# Altium footprint library SM712PTCT.PcbLib: 3 footprints
Each footprint in its own frame and in the unit in brackets; x right, y up, seen from the top. Pads: shape width x height; smd on the part's side, far side on the other; paste and mask are expansions set on the pad; w line width, h text height; cw(c..) or ccw(c..) is an arc to the next point about the centre after c.
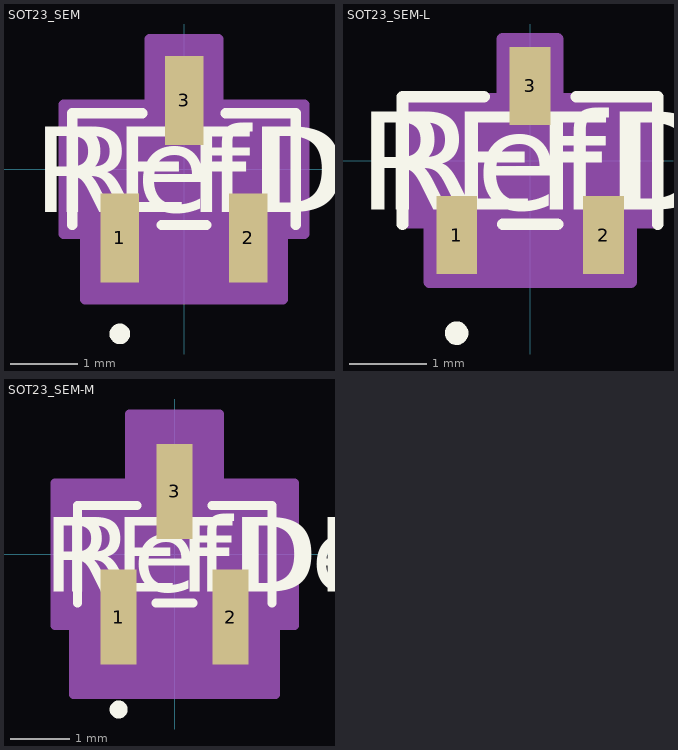
[diagram p0: the footprints below, top view; thin cyan lines are the x and y axes]

## SOT23_SEM [mil]
pads (3):
  rect 22.36x51.56 smd paste+0 mask+0: 1(-37.4,-40) 2(37.4,-40) 3(0,40)
Top Overlay:
  circle w6: c-37.4,-95.78 r3
  lines w6: -65,-32.5 -65,32.5 -24.28,32.5 ; -13.12,-32.5 13.12,-32.5 ; 24.28,32.5 65,32.5 65,-32.5
  text "REFDES" at -87.5,-25 h50
  text "RefDes" at -75,-25 h50
Mechanical 13:
  circle w0: c-37.4,-17.5 r3
  lines w1: -60,-27.5 60,-27.5 60,27.5 -60,27.5 -60,-27.5 ; -47.4,-52 -47.4,-27.5 -27.4,-27.5 -27.4,-52 -47.4,-52 ; -10,27.5 10,27.5 10,52 -10,52 -10,27.5 ; 27.4,-52 27.4,-27.5 47.4,-27.5 47.4,-52 27.4,-52
  text "RefDes2" at -87.5,-25 h50
Mechanical 15:
  region: -70,-37.5 -70,37.5 -20,37.5 -20,75.78 20,75.78 20,37.5 70,37.5 70,-37.5 57.4,-37.5 57.4,-75.78 -57.4,-75.78 -57.4,-37.5
  lines w6: -70,-37.5 -70,37.5 -20,37.5 -20,75.78 20,75.78 20,37.5 70,37.5 70,-37.5 57.4,-37.5 57.4,-75.78 -57.4,-75.78 -57.4,-37.5 -70,-37.5
3D body "SOT23_SEM.step": height 44.09, standoff 0, extent -60,-52.01 60,52.01

## SOT23_SEM-L [mm]
pads (3):
  rect 0.528x1.01 smd paste+0 mask+0: 1(-0.95,-0.966) 2(0.95,-0.966) 3(0,0.966)
Top Overlay:
  circle w0.152: c-0.95,-2.233 r0.076
  lines w0.152: -1.651,-0.826 -1.651,0.826 -0.597,0.826 ; -0.353,-0.826 0.353,-0.826 ; 0.597,0.826 1.651,0.826 1.651,-0.826
  text "REFDES" at -2.222,-0.635 h1.27
  text "RefDes" at -1.905,-0.635 h1.27
Mechanical 13:
  circle w0: c-0.95,-0.445 r0.076
  lines w0.025: -1.524,-0.699 1.524,-0.699 1.524,0.699 -1.524,0.699 -1.524,-0.699 ; -1.204,-1.321 -1.204,-0.699 -0.696,-0.699 -0.696,-1.321 -1.204,-1.321 ; -0.254,0.699 0.254,0.699 0.254,1.321 -0.254,1.321 -0.254,0.699 ; 0.696,-1.321 0.696,-0.699 1.204,-0.699 1.204,-1.321 0.696,-1.321
  text "RefDes2" at -2.222,-0.635 h1.27
Mechanical 15:
  region: -1.626,-0.8 -1.626,0.8 -0.356,0.8 -0.356,1.572 0.356,1.572 0.356,0.8 1.626,0.8 1.626,-0.8 1.306,-0.8 1.306,-1.572 -1.306,-1.572 -1.306,-0.8
  lines w0.152: -1.626,-0.8 -1.626,0.8 -0.356,0.8 -0.356,1.572 0.356,1.572 0.356,0.8 1.626,0.8 1.626,-0.8 1.306,-0.8 1.306,-1.572 -1.306,-1.572 -1.306,-0.8 -1.626,-0.8
3D body "SOT23_SEM.step": height 1.12, standoff 0, extent -1.524,-1.321 1.524,1.321

## SOT23_SEM-M [mm]
pads (3):
  rect 0.608x1.61 smd paste+0 mask+0: 1(-0.95,-1.066) 2(0.95,-1.066) 3(0,1.066)
Top Overlay:
  circle w0.152: c-0.95,-2.633 r0.076
  lines w0.152: -1.651,-0.826 -1.651,0.826 -0.637,0.826 ; -0.313,-0.826 0.313,-0.826 ; 0.637,0.826 1.651,0.826 1.651,-0.826
  text "REFDES" at -2.222,-0.635 h1.27
  text "RefDes" at -1.905,-0.635 h1.27
Mechanical 13:
  circle w0: c-0.95,-0.445 r0.076
  lines w0.025: -1.524,-0.699 1.524,-0.699 1.524,0.699 -1.524,0.699 -1.524,-0.699 ; -1.204,-1.321 -1.204,-0.699 -0.696,-0.699 -0.696,-1.321 -1.204,-1.321 ; -0.254,0.699 0.254,0.699 0.254,1.321 -0.254,1.321 -0.254,0.699 ; 0.696,-1.321 0.696,-0.699 1.204,-0.699 1.204,-1.321 0.696,-1.321
  text "RefDes2" at -2.222,-0.635 h1.27
Mechanical 15:
  region: -2.032,-1.206 -2.032,1.206 -0.762,1.206 -0.762,2.379 0.762,2.379 0.762,1.206 2.032,1.206 2.032,-1.206 1.712,-1.206 1.712,-2.379 -1.712,-2.379 -1.712,-1.206
  lines w0.152: -2.032,-1.206 -2.032,1.206 -0.762,1.206 -0.762,2.379 0.762,2.379 0.762,1.206 2.032,1.206 2.032,-1.206 1.712,-1.206 1.712,-2.379 -1.712,-2.379 -1.712,-1.206 -2.032,-1.206
3D body "SOT23_SEM.step": height 1.12, standoff 0, extent -1.524,-1.321 1.524,1.321